# Altium schematic symbol library 3296Y-1-104LF.SchLib: 1 symbol
Pins are listed as number, name and electrical type; pins without a type are passive.

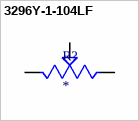
[diagram p0: symbol 3296Y-1-104LF]

## 3296Y-1-104LF
designator R?
100 kOhms 0.5W, 1/2W PC Pins Through Hole Trimmer Potentiometer Cermet 25.0 Turn Top Adjustment; MP: 3296Y-1-104LF; Availability: Unavailable; Value: *; Package: None; Price: None
footprint TRIM_3296Y-1-104LF
pins: 1 CCW, 2 WIPER, 3 CW